# Altium footprint library PcbLib2.PcbLib: 12 footprints
Each footprint in its own frame and in the unit in brackets; x right, y up, seen from the top. Pads: shape width x height; smd on the part's side, far side on the other; paste and mask are expansions set on the pad; w line width, h text height; cw(c..) or ccw(c..) is an arc to the next point about the centre after c.
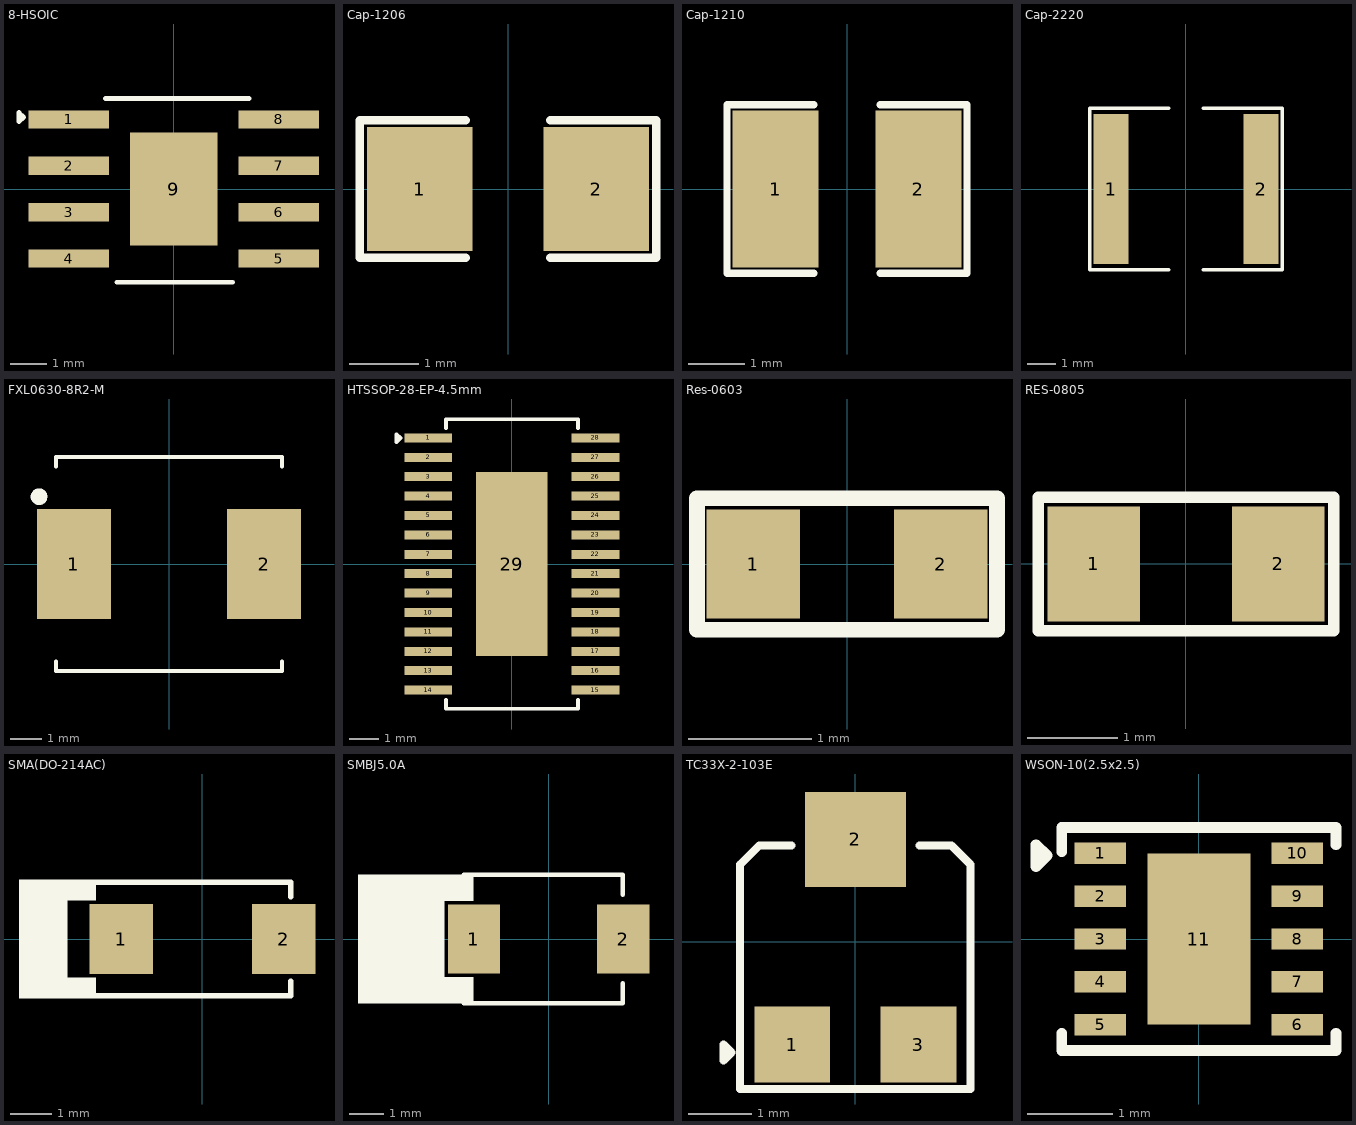
[diagram p0: the footprints below, top view; thin cyan lines are the x and y axes]

## 8-HSOIC [mm]
pads (9):
  rect 2.2x0.5 smd: 1(-2.875,1.905) 2(-2.875,0.635) 3(-2.875,-0.635) 4(-2.875,-1.905) 5(2.875,-1.905) 6(2.875,-0.635) 7(2.875,0.635) 8(2.875,1.905)
  rect 2.4x3.1 smd: 9(0,0)
Top Overlay:
  lines w0.127: -1.872,2.479 2.065,2.479 ; -1.567,-2.551 1.608,-2.551 ; -4.241,1.841 -4.114,1.968 -4.241,2.095 -4.241,1.841
3D body "AP64501SP-13.STEP": height 1.7, standoff 0, extent -3,-2.45 3,2.45

## Cap-1206 [mil]
pads (2):
  rect 60x70 smd: 1(-50,0) 2(50,0)
Top Overlay:
  lines w5: -24,-39 -84,-39 -84,39 -24,39 ; 24,-39 84,-39 84,39 24,39
3D body "User Library-1206 SMD Capacitor.step": height 39.45, standoff 0, extent -62.96,-31.46 63.03,31.53

## Cap-1210 [mil] "SMD 1210"
pads (2):
  rect 60x110 smd: 1(-50,0) 2(50,0)
Top Overlay:
  lines w5: -23,-59 -84,-59 -84,59 -23,59 ; 23,-59 84,-59 84,59 23,59
3D body "User Library-CAPC3225X10.step": height 39.37, standoff 0, extent -62.99,-49.21 63,49.22

## Cap-2220 [mm]
pads (2):
  rect 1.2x5.2 smd: 1(-2.6,0) 2(2.6,0)
Top Overlay:
  lines w0.127: -0.6,-2.799 -3.334,-2.799 -3.334,2.8 -0.6,2.8 ; 0.6,-2.8 3.334,-2.8 3.334,2.799 0.6,2.799
3D body "CAP2220.stp": height 2.24, standoff -0.04, extent -2.85,-2.5 2.85,2.5

## FXL0630-8R2-M [mm]
pads (2):
  rect 2.35x3.5 smd: 1(-3.025,0) 2(3.025,0)
Top Overlay:
  circle w0.254: c-4.138,2.143 r0.137
  lines w0.127: -3.6,-3.104 -3.6,-3.404 3.6,-3.404 3.6,-3.1 ; -3.6,3.1 -3.6,3.404 3.596,3.404 3.6,3.4 3.6,3.1
3D body "fxl0630-8r2m..STEP": height 2.6, standoff -0.2, extent -3.5,-3.3 3.5,3.3

## HTSSOP-28-EP-4.5mm [mm]
pads (29):
  rect 1.6x0.3 smd: 1(-2.8,4.225) 2(-2.8,3.575) 3(-2.8,2.925) 4(-2.8,2.275) 5(-2.8,1.625) 6(-2.8,0.975) 7(-2.8,0.325) 8(-2.8,-0.325) 9(-2.8,-0.975) 10(-2.8,-1.625) 11(-2.8,-2.275) 12(-2.8,-2.925) 13(-2.8,-3.575) 14(-2.8,-4.225) 15(2.8,-4.225) 16(2.8,-3.575) 17(2.8,-2.925) 18(2.8,-2.275) 19(2.8,-1.625) 20(2.8,-0.975) 21(2.8,-0.325) 22(2.8,0.325) 23(2.8,0.975) 24(2.8,1.625) 25(2.8,2.275) 26(2.8,2.925) 27(2.8,3.575) 28(2.8,4.225)
  rect 2.4x6.17 smd: 29(0,0)
Top Overlay:
  lines w0.127: -2.21,-4.547 -2.21,-4.851 2.21,-4.851 2.21,-4.547 ; -2.21,4.547 -2.21,4.851 2.21,4.851 2.21,4.547 ; -3.861,4.089 -3.861,4.343 -3.734,4.216 -3.861,4.089
3D body "TPA3111D1PWPR.STEP": height 1.2, standoff 0, extent -3.2,-4.85 3.2,4.85

## Res-0603 [mil]
pads (2):
  rect 30x35 smd: 1(-30,0) 2(30,0)
Top Overlay:
  lines w5: -48,-21 48,-21 48,21 -48,21 -48,-21
3D body "User Library-RESC1608X05N.step": height 17.76, standoff 0, extent -30.52,-16.74 30.51,16.73

## RES-0805 [mil] "SMD 0805"
pads (2):
  rect 40x50 smd: 1(-40,0) 2(40,0)
Top Overlay:
  lines w5: -64,-29 -64,29 64,29 64,-29 -64,-29
3D body "User Library-CR2012-0805.STEP": height 23.62, standoff 0, extent -39.34,-24.75 39.4,24.46

## SMA(DO-214AC) [mm]
pads (2):
  rect 1.52x1.68 smd: 1(-1.95,0) 2(1.95,0)
Top Overlay:
  rectangle: -3.249,0.924 -2.545,1.422
  rectangle: -4.394,-1.422 -3.227,1.422
  rectangle: -3.249,-1.422 -2.545,-0.924
  lines w0.127: -2.607,-1.358 2.112,-1.358 2.112,-1.012 ; -2.607,1.358 2.112,1.358 2.112,1.012
3D body "User Library-DO-214AC SMA.step": height 2.4, standoff 0, extent -2.6,-1.3 2.6,1.3

## SMBJ5.0A [mm]
pads (2):
  rect 1.5x2 smd: 1(-2.15,0) 2(2.15,0)
Top Overlay:
  rectangle: -5.486,-1.854 -2.997,1.854
  rectangle: -3.048,1.092 -2.159,1.854
  rectangle: -3.048,-1.854 -2.159,-1.092
  lines w0.127: -2.438,-1.854 2.134,-1.854 2.134,-1.27 ; -2.438,1.854 2.134,1.854 2.134,1.27
3D body "User Library-DO-214AA SMB.STEP": height 2.3, standoff 0, extent -2.7,-1.8 2.7,1.8

## TC33X-2-103E [mm]
pads (3):
  rect 1.2x1.2 smd: 1(-1,-1.625) 3(1,-1.625)
  rect 1.6x1.5 smd: 2(0,1.625)
Top Overlay:
  lines w0.127: -1.016,1.53 -1.524,1.53 -1.826,1.228 -1.826,-2.33 1.826,-2.33 1.826,1.228 1.524,1.53 1.016,1.53 ; -2.092,-1.879 -1.965,-1.752 -2.092,-1.625 -2.092,-1.879
3D body "TC-33X-2.stp": height 1.13, standoff -0.02, extent -1.8,-1.913 1.8,2.05

## WSON-10(2.5x2.5) [mm]
pads (11):
  rect 0.6x0.25 smd: 1(-1.15,1) 2(-1.15,0.5) 3(-1.15,0) 4(-1.15,-0.5) 5(-1.15,-1) 6(1.15,-1) 7(1.15,-0.5) 8(1.15,0) 9(1.15,0.5) 10(1.15,1)
  rect 1.2x2 smd: 11(0,0)
Top Overlay:
  lines w0.127: -1.6,-1.1 -1.6,-1.3 1.6,-1.3 1.6,-1.1 ; -1.6,1.017 -1.6,1.3 1.6,1.3 1.6,1.1 ; -1.9,0.846 -1.9,1.1 -1.773,0.973 -1.9,0.846
3D body "DSK0010C.stp": height 0.77, standoff 0, extent -1.25,-1.25 1.25,1.25